# Altium footprint library Capacitors.PcbLib: 20 footprints (part 1 of 2)
Each footprint in its own frame and in the unit in brackets; x right, y up, seen from the top. Pads: shape width x height; smd on the part's side, far side on the other; paste and mask are expansions set on the pad; w line width, h text height; cw(c..) or ccw(c..) is an arc to the next point about the centre after c.
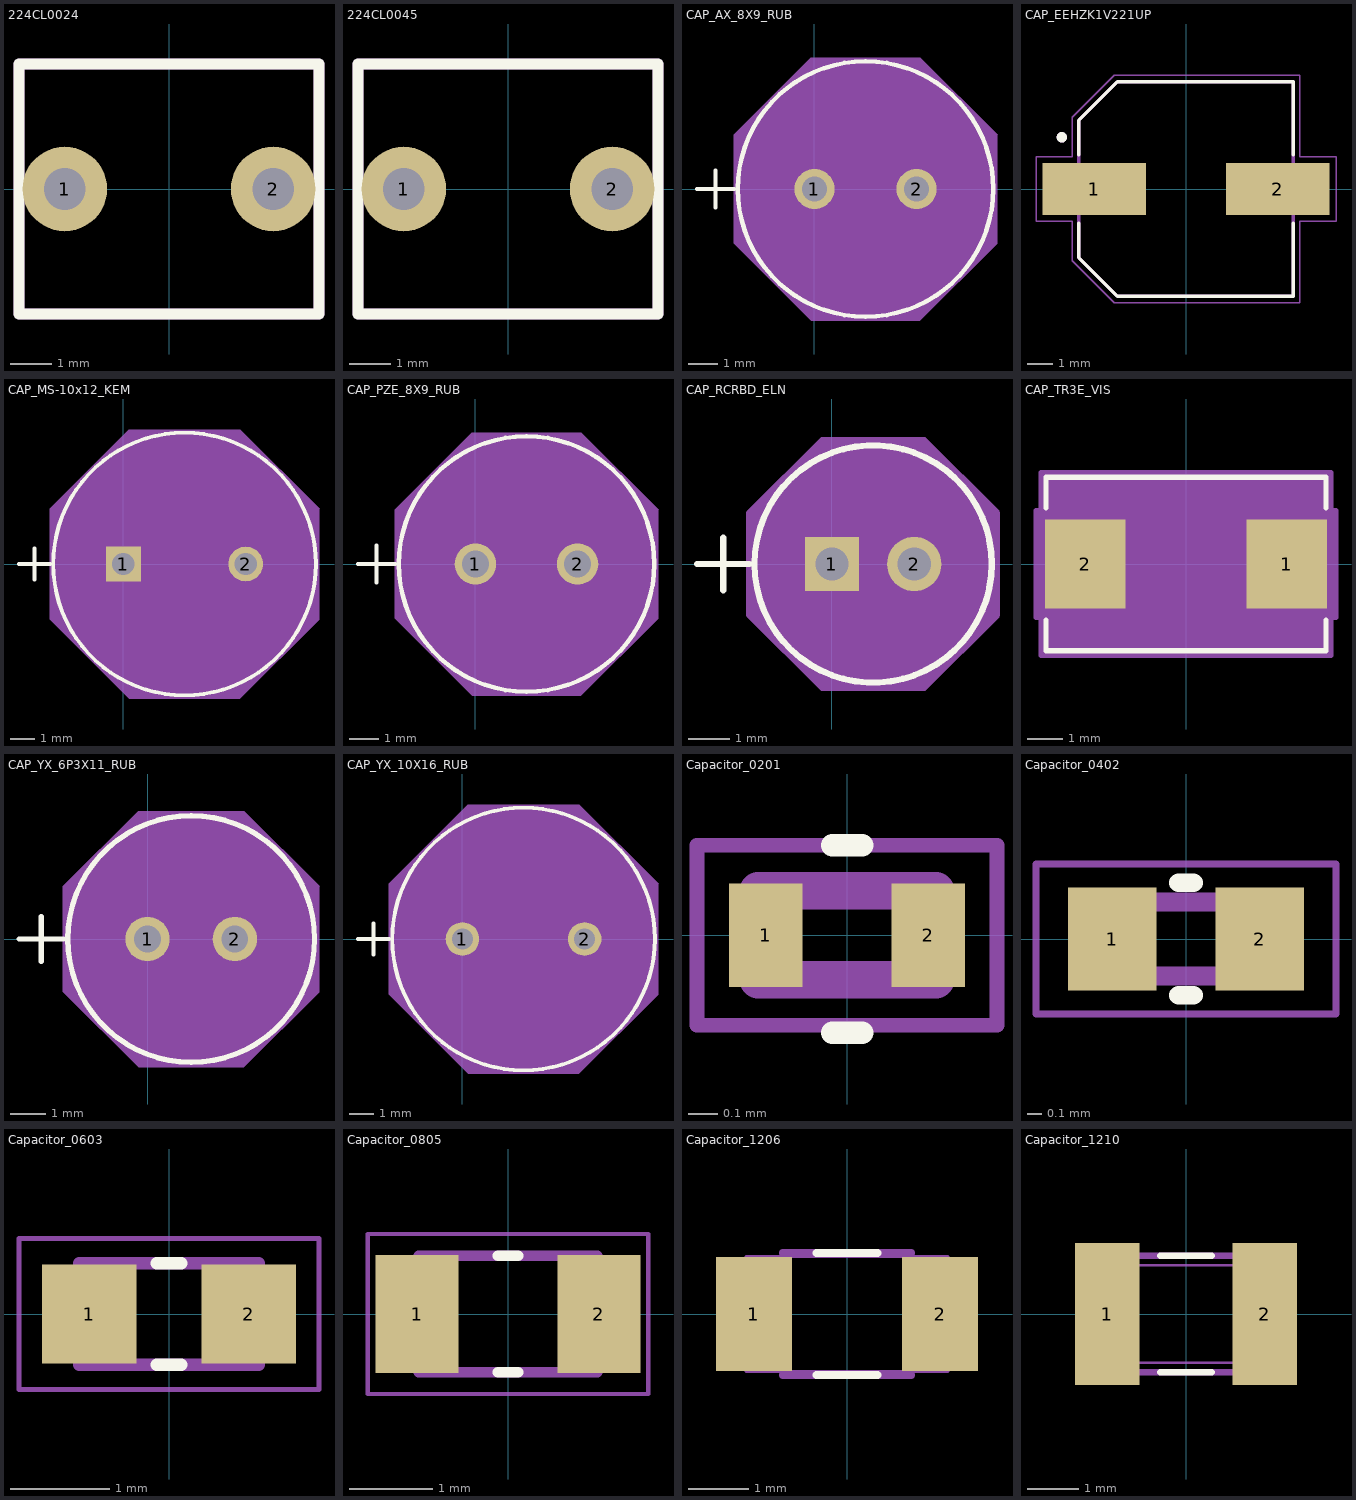
[diagram p0: the footprints below, top view; thin cyan lines are the x and y axes]

## 224CL0024 [mm]
pads (2):
  round 2.032 hole 1: 1(-2.5,0) 2(2.5,0)
Top Overlay:
  lines w0.254: -3.6,-3 3.6,-3 3.6,3 -3.6,3 -3.6,-3
Mechanical 15:
  lines w0.254: -3.6,-3 3.6,-3 3.6,3 -3.6,3 -3.6,-3
3D body "224CL0024.STEP": height 11.01, standoff -17.99, extent -3.6,-3 3.6,3

## 224CL0045 [mm]
pads (2):
  round 2.032 hole 1: 1(-2.5,0) 2(2.5,0)
Top Overlay:
  lines w0.254: -3.6,-3 3.6,-3 3.6,3 -3.6,3 -3.6,-3
Mechanical 15:
  lines w0.254: -3.6,-3 -3.6,3 3.6,3 3.6,-3 -3.6,-3
3D body "224CL0045.STEP": height 11.01, standoff -17.99, extent -3.6,-3 3.6,3

## CAP_AX_8X9_RUB [mil]
pads (2):
  round 54 / inner round 60 / far side round 54 hole 34 paste-99999 mask+0: 1(0,0) 2(137.8,0)
Top Overlay:
  circle w6: c68.9,0 r172.5
  lines w6: -158.6,0 -108.6,0 ; -133.6,-25 -133.6,25
Mechanical 13:
  circle w0: c68.9,0 r167.5
  lines w1: -158.6,0 -108.6,0 ; -133.6,-25 -133.6,25
Mechanical 15:
  region: -108.6,73.09 -4.19,177.5 141.99,177.5 246.4,73.09 246.4,-73.09 141.99,-177.5 -4.19,-177.5 -108.6,-73.09
  lines w1: -108.6,-73.09 -4.19,-177.5 141.99,-177.5 246.4,-73.09 246.4,73.09 141.99,177.5 -4.19,177.5 -108.6,73.09 -108.6,-73.09
3D body "CAP_AX_8X9_RUB.step": height 413.62, standoff -172.01, extent -98.58,-167.38 237.43,167.38

## CAP_EEHZK1V221UP [mm]
pads (2):
  rect 4x2 smd: 1(-3.55,0) 2(3.55,0)
Top Overlay:
  circle w0.2: c-4.8,2 r0.1
  lines w0.127: -4.15,-1.32 -4.15,-2.65 -2.65,-4.15 4.15,-4.15 4.15,-1.32 ; -4.15,1.32 -4.15,2.65 -2.65,4.15 4.15,4.15 4.15,1.32
Mechanical 13:
  circle w0.2: c-4.8,2 r0.1
  lines w0.127: -4.15,-2.65 -2.65,-4.15 4.15,-4.15 4.15,4.15 -2.65,4.15 -4.15,2.65 -4.15,-2.65
Mechanical 15:
  lines w0.05: -5.8,-1.25 -5.8,1.25 -4.4,1.25 -4.4,2.775 -2.775,4.4 4.4,4.4 4.4,1.25 5.8,1.25 5.8,-1.25 4.4,-1.25 4.4,-4.4 -2.775,-4.4 -4.4,-2.775 -4.4,-1.25 -5.8,-1.25
3D body "step_temp.STEP": height 10.2, standoff 0, extent -4.85,-4.15 4.85,4.15

## CAP_MS-10x12_KEM [mil]
pads (2):
  rect 56x56 hole 36 paste-99999 mask+0: 1(0,0)
  round 56 hole 36 paste-99999 mask+0: 2(196.85,0)
Top Overlay:
  circle w6: c98.43,0 r211.5
  lines w6: -168.07,0 -118.07,0 ; -143.07,-25 -143.07,25
Mechanical 13:
  circle w0: c98.43,0 r206.5
  lines w1: -168.07,0 -118.07,0 ; -143.07,-25 -143.07,25
Mechanical 15:
  region: -118.07,89.15 9.28,216.5 187.57,216.5 314.93,89.15 314.93,-89.15 187.57,-216.5 9.28,-216.5 -118.07,-89.15
  lines w1: -118.07,-89.15 -118.07,89.15 9.28,216.5 187.57,216.5 314.93,89.15 314.93,-89.15 187.57,-216.5 9.28,-216.5 -118.07,-89.15
3D body "CAP_MS-10x12_KEM.step": height 502.6, standoff -177.99, extent -108.07,-206.02 305.88,206.02

## CAP_PZE_8X9_RUB [mil]
pads (2):
  round 56 / inner round 60 / far side round 56 hole 36 paste-99999 mask+0: 1(0,0) 2(137.8,0)
Top Overlay:
  circle w6: c68.9,0 r172.5
  lines w6: -158.6,0 -108.6,0 ; -133.6,-25 -133.6,25
Mechanical 13:
  circle w0: c68.9,0 r167.5
  lines w1: -158.6,0 -108.6,0 ; -133.6,-25 -133.6,25
Mechanical 15:
  region: -108.6,73.09 -4.19,177.5 141.99,177.5 246.4,73.09 246.4,-73.09 141.99,-177.5 -4.19,-177.5 -108.6,-73.09
  lines w1: -108.6,-73.09 -108.6,73.09 -4.19,177.5 141.99,177.5 246.4,73.09 246.4,-73.09 141.99,-177.5 -4.19,-177.5 -108.6,-73.09
3D body "CAP_PZE_8X9_RUB.step": height 433.62, standoff -177.99, extent -98.58,-167.38 237.43,167.38

## CAP_RCRBD_ELN [mil]
pads (2):
  rect 52x52 / inner round 60 / far side rect 52x52 hole 32 paste-99999 mask+0: 1(0,0)
  round 52 / inner round 60 / far side round 52 hole 32 paste-99999 mask+0: 2(78.74,0)
Top Overlay:
  circle w6: c39.37,0 r113.5
  lines w6: -129.13,0 -79.13,0 ; -104.13,-25 -104.13,25
Mechanical 13:
  circle w0: c39.37,0 r108.5
  lines w1: -129.13,0 -79.13,0 ; -104.13,-25 -104.13,25
Mechanical 15:
  region: -79.13,48.79 -9.42,118.5 88.16,118.5 157.87,48.79 157.87,-48.79 88.16,-118.5 -9.42,-118.5 -79.13,-48.79
  lines w6: -79.13,-48.79 -79.13,48.79 -9.42,118.5 88.16,118.5 157.87,48.79 157.87,-48.79 88.16,-118.5 -9.42,-118.5 -79.13,-48.79
3D body "CAP_RCRBD_ELN.step": height 462.6, standoff -165.98, extent -69.13,-108.38 149.03,108.38

## CAP_TR3E_VIS [mil]
pads (2):
  rect 89x98 smd paste+0 mask+0: 1(111,0) 2(-111,0)
Top Overlay:
  lines w6: -154.5,-62.1 -154.5,-95.5 154.5,-95.5 154.5,-62.1 ; -154.5,62.1 -154.5,95.5 154.5,95.5 154.5,62.1
Mechanical 13:
  lines w1: -149.5,-90.5 149.5,-90.5 149.5,90.5 -149.5,90.5 -149.5,-90.5
Mechanical 15:
  region: -159.5,-59 -165.5,-59 -165.5,59 -159.5,59 -159.5,100.5 159.5,100.5 159.5,59 165.5,59 165.5,-59 159.5,-59 159.5,-100.5 -159.5,-100.5
  lines w6: -165.5,-59 -165.5,59 -159.5,59 -159.5,100.5 159.5,100.5 159.5,59 165.5,59 165.5,-59 159.5,-59 159.5,-100.5 -159.5,-100.5 -159.5,-59 -165.5,-59
3D body "CAP_TR3E_VIS.step": height 170.98, standoff 0, extent -149.49,-90.51 149.49,90.51

## CAP_YX_6P3X11_RUB [mil]
pads (2):
  round 50 / inner round 60 / far side round 50 hole 30 paste-99999 mask+0: 1(0,0) 2(98.43,0)
Top Overlay:
  circle w6: c49.21,0 r139
  lines w6: -144.79,0 -94.79,0 ; -119.79,-25 -119.79,25
Mechanical 13:
  circle w0: c49.21,0 r134
  lines w1: -144.79,0 -94.79,0 ; -119.79,-25 -119.79,25
Mechanical 15:
  region: -94.79,59.29 -10.08,144 108.51,144 193.21,59.29 193.21,-59.29 108.51,-144 -10.08,-144 -94.79,-59.29
  lines w1: -94.79,-59.29 -10.08,-144 108.51,-144 193.21,-59.29 193.21,59.29 108.51,144 -10.08,144 -94.79,59.29 -94.79,-59.29
3D body "CAP_YX_6P3X11_RUB.step": height 492.6, standoff -160, extent -84.8,-133.88 184.32,133.88

## CAP_YX_10X16_RUB [mil]
pads (2):
  round 54 / inner round 60 / far side round 54 hole 34 paste-99999 mask+0: 1(0,0) 2(196.85,0)
Top Overlay:
  circle w6: c98.43,0 r211.5
  lines w6: -168.07,0 -118.07,0 ; -143.07,-25 -143.07,25
Mechanical 13:
  circle w0: c98.43,0 r206.5
  lines w1: -168.07,0 -118.07,0 ; -143.07,-25 -143.07,25
Mechanical 15:
  region: -118.07,89.15 9.28,216.5 187.57,216.5 314.93,89.15 314.93,-89.15 187.57,-216.5 9.28,-216.5 -118.07,-89.15
  lines w1: -118.07,-89.15 -118.07,89.15 9.28,216.5 187.57,216.5 314.93,89.15 314.93,-89.15 187.57,-216.5 9.28,-216.5 -118.07,-89.15
3D body "CAP_YX_10X16_RUB.step": height 551.61, standoff -172.01, extent -108.07,-206.02 305.88,206.02

## Capacitor_0201 [mm]
pads (2):
  rect 0.25x0.35 smd mask+0.025: 1(-0.275,0) 2(0.275,0)
Top Overlay:
  lines w0.076: -0.051,-0.33 0.051,-0.33 ; -0.051,0.305 0.051,0.305
Mechanical 13:
  lines w0.127: -0.3,-0.15 0.3,-0.15 0.3,0.15 -0.3,0.15 -0.3,-0.15
Mechanical 15:
  lines w0.05: -0.508,-0.305 0.508,-0.305 0.508,0.305 -0.508,0.305 -0.508,-0.305
3D body "0201X104K160CT.STEP": height 0.3, standoff 0, extent -0.3,-0.175 0.3,0.175

## Capacitor_0402 [mm]
pads (2):
  rect 0.6x0.7 smd mask+0.025: 1(-0.5,0) 2(0.5,0)
Top Overlay:
  lines w0.127: -0.051,-0.381 0.051,-0.381 ; -0.051,0.381 0.051,0.381
Mechanical 13:
  lines w0.127: -0.5,-0.25 -0.5,0.25 0.5,0.25 0.5,-0.25 -0.5,-0.25
Mechanical 15:
  lines w0.05: -1.016,-0.508 -1.016,0.508 1.016,0.508 1.016,-0.508 -1.016,-0.508
3D body "CAP_0402_N_WAL.step": height 0.57, standoff 0, extent -0.486,-0.255 0.556,0.303

## Capacitor_0603 [mm]
pads (2):
  rect 0.95x1 smd mask+0.025: 1(-0.8,0) 2(0.8,0)
Top Overlay:
  lines w0.127: -0.12,-0.51 0.12,-0.51 ; -0.12,0.51 0.12,0.51
Mechanical 13:
  lines w0.127: -0.9,-0.51 0.9,-0.51 0.9,0.51 -0.9,0.51 -0.9,-0.51
Mechanical 15:
  lines w0.05: -1.508,-0.761 1.508,-0.761 1.508,0.761 -1.508,0.761 -1.508,-0.761
3D body "CAPC1608X08N.step": height 0.8, standoff 0, extent -0.8,-0.4 0.8,0.4

## Capacitor_0805 [mm]
pads (2):
  rect 1x1.42 smd mask+0.025: 1(-1.092,0) 2(1.092,0)
Top Overlay:
  lines w0.127: -0.12,-0.7 0.12,-0.7 ; -0.12,0.7 0.12,0.7
Mechanical 13:
  lines w0.127: -1.07,-0.7 1.07,-0.7 1.07,0.7 -1.07,0.7 -1.07,-0.7
Mechanical 15:
  lines w0.05: -1.685,-0.96 1.685,-0.96 1.685,0.96 -1.685,0.96 -1.685,-0.96
3D body "CAPC2012X08N.step": height 0.8, standoff 0, extent -1,-0.625 1,0.625

## Capacitor_1206 [mm]
pads (2):
  rect 1.27x1.9 smd mask+0.025: 1(-1.55,0) 2(1.55,0)
Top Overlay:
  lines w0.127: -0.508,-1.016 0.508,-1.016 ; -0.508,1.016 0.508,1.016
Mechanical 13:
  lines w0.127: -1.07,-1.016 1.07,-1.016 ; -1.07,-0.7 -1.07,0.7 ; -1.07,1.016 1.07,1.016 ; 1.07,-0.7 1.07,0.7
Mechanical 15:
  lines w0.05: -1.685,-0.96 1.685,-0.96 1.685,0.96 -1.685,0.96 -1.685,-0.96
3D body "C1206-H1.8.STEP": height 1.59, standoff -0.01, extent -1.6,-0.889 1.6,0.912

## Capacitor_1210 [mm]
pads (2):
  rect 1.27x2.794 smd mask+0.025: 1(-1.55,0) 2(1.55,0)
Top Overlay:
  lines w0.127: -0.508,-1.143 0.508,-1.143 ; -0.508,1.143 0.508,1.143
Mechanical 13:
  lines w0.127: -1.07,-1.143 1.07,-1.143 ; -1.07,-0.7 -1.07,0.7 ; -1.07,1.143 1.07,1.143 ; 1.07,-0.7 1.07,0.7
Mechanical 15:
  lines w0.05: -1.685,-0.96 -1.685,0.96 1.685,0.96 1.685,-0.96 -1.685,-0.96
3D body "ECHU1H223GX5.step": height 1.5, standoff 0, extent -1.6,-1.25 1.6,1.25